# Altium integrated library RP73PF1J10KBTDF.IntLib: 1 symbol
Pins are listed as number, name and electrical type; pins without a type are passive.

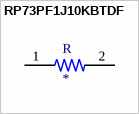
[diagram p0: symbol RP73PF1J10KBTDF]

## RP73PF1J10KBTDF
designator R
Thin Film Resistors - SMD 10K OHM .1% 25PPM; Voltage_Rating: 75 V; MP: RP73PF1J10KBTDF; Power_Rating: .166 W; MF: TE Connectivity; Mouser-Purchase-URL: https://snapeda.com/shop?store=Mouser&id=550687; Value: *; SnapEDA_Link: https://www.snapeda.com/parts/RP73PF1J10KBTDF/TE%20Connectivity%20Passive%20Product/view-part/550687/?ref=snap; Tolerance: .1%; Digi-Key_Part_Number: A110204CT-ND; Resistance: 10K; Package: 0603
footprint RESC1608X50N
pins: 1, 2